# Altium footprint library Radolovic_PCB_Library.PcbLib: 38 footprints (part 3 of 3)
Each footprint in its own frame and in the unit in brackets; x right, y up, seen from the top. Pads: shape width x height; smd on the part's side, far side on the other; paste and mask are expansions set on the pad; w line width, h text height; cw(c..) or ccw(c..) is an arc to the next point about the centre after c.
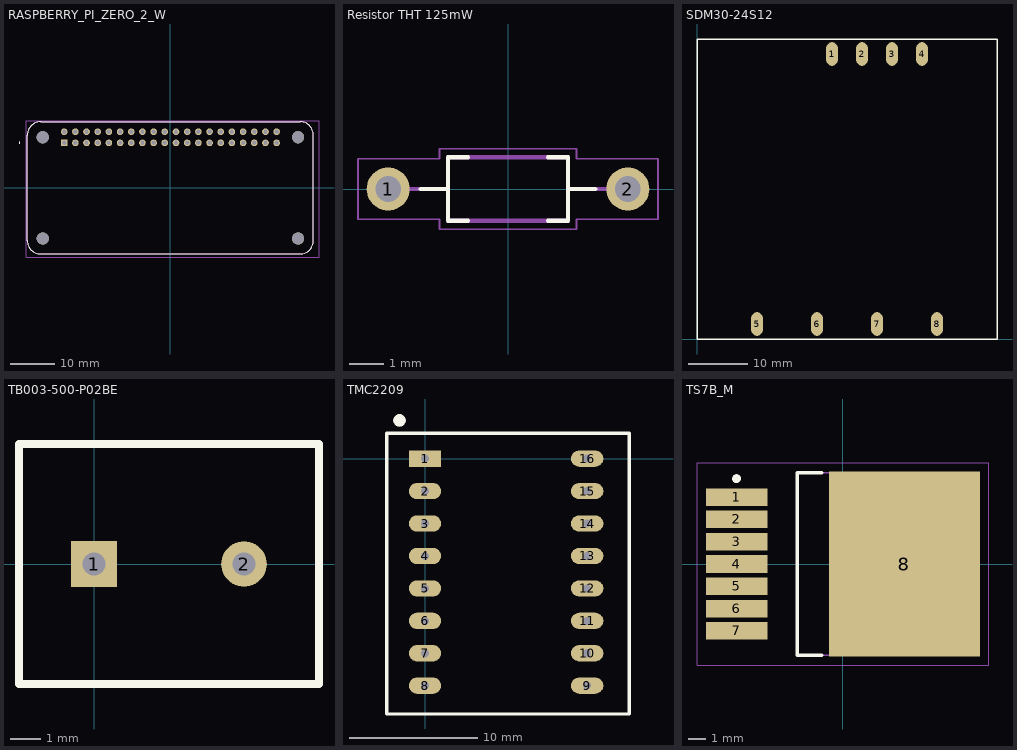
[diagram p2: the footprints below, top view; thin cyan lines are the x and y axes]

## RASPBERRY_PI_ZERO_2_W [mm]
pads (44):
  rect 1.508x1.508 / inner round 1.508 / far side rect 1.508x1.508 hole 1: 1(-24.13,10.23)
  round 1.508 hole 1: 2(-24.13,12.77) 3(-21.59,10.23) 4(-21.59,12.77) 5(-19.05,10.23) 6(-19.05,12.77) 7(-16.51,10.23) 8(-16.51,12.77) 9(-13.97,10.23) 10(-13.97,12.77) 11(-11.43,10.23) 12(-11.43,12.77) 13(-8.89,10.23) 14(-8.89,12.77) 15(-6.35,10.23) 16(-6.35,12.77) 17(-3.81,10.23) 18(-3.81,12.77) 19(-1.27,10.23) 20(-1.27,12.77) 21(1.27,10.23) 22(1.27,12.77) 23(3.81,10.23) 24(3.81,12.77) 25(6.35,10.23) 26(6.35,12.77) 27(8.89,10.23) 28(8.89,12.77) 29(11.43,10.23) 30(11.43,12.77) 31(13.97,10.23) 32(13.97,12.77) 33(16.51,10.23) 34(16.51,12.77) 35(19.05,10.23) 36(19.05,12.77) 37(21.59,10.23) 38(21.59,12.77) 39(24.13,10.23) 40(24.13,12.77)
  round 2.75 hole 2.75 unplated: ""(-29,-11.5) ""(-29,11.5) ""(29,-11.5) ""(29,11.5)
Top Overlay:
  circle w0.2: c-34.29,10.23 r0.1
  lines w0.127: 4.4,-15 12.75,-15 ; 17,-15 25.35,-15 ; -32.5,-12 ccw(c-29.5,-12) -29.5,-15 29.5,-15 ccw(c29.5,-12) 32.5,-12 32.5,12 ccw(c29.5,12) 29.5,15 -29.5,15 ccw(c-29.5,12) -32.5,12 -32.5,-12
Mechanical 13:
  circle w0.2: c-34.29,10.23 r0.1
  lines w0.127: 4.4,-15 12.75,-15 ; 17,-15 25.35,-15 ; -32.5,-12 ccw(c-29.5,-12) -29.5,-15 29.5,-15 ccw(c29.5,-12) 32.5,-12 32.5,12 ccw(c29.5,12) 29.5,15 -29.5,15 ccw(c-29.5,12) -32.5,12 -32.5,-12
Mechanical 15:
  lines w0.05: -32.75,-15.75 -32.75,15.25 33.75,15.25 33.75,-15.75 -32.75,-15.75
3D body "step_temp.STEP": height 4.57, standoff -1.04, extent -32.5,-16 33.5,15

## Resistor THT 125mW [mm]
height 3.85
pads (2):
  round 1.258 hole 0.75: 1(-3.5,0) 2(3.5,0)
Top Overlay:
  lines w0.127: -2.55,0 -1.75,0 ; -1.17,-0.925 -1.75,-0.925 -1.75,0 ; -1.17,0.925 -1.75,0.925 -1.75,0 ; 1.17,-0.925 1.75,-0.925 1.75,0 ; 1.17,0.925 1.75,0.925 1.75,0 ; 2.55,0 1.75,0
Mechanical 13:
  lines w0.127: -2.925,0 -1.75,0 ; 2.925,0 1.75,0 ; -1.75,0 -1.75,0.925 1.75,0.925 1.75,0 ; -1.75,0 -1.75,-0.925 1.75,-0.925 1.75,0
Mechanical 15:
  lines w0.05: -4.38,-0.88 -4.38,0.88 -2,0.88 -2,1.175 2,1.175 2,0.88 4.38,0.88 4.38,-0.88 2,-0.88 2,-1.175 -2,-1.175 -2,-0.88 -4.38,-0.88
3D body "step_temp.STEP": height 1.84, standoff -3.6, extent -3.723,-0.923 3.723,0.923

## SDM30-24S12 [mm] "SDM30-24S12"
pads (8):
  oval 2x4 hole 0.4: 1(22.86,48.26) 2(27.94,48.26) 3(33.02,48.26) 4(38.1,48.26) 5(10.16,2.54) 6(20.32,2.54) 7(30.48,2.54) 8(40.64,2.54)
Top Overlay:
  lines w0.254: 0,0 50.8,0 50.8,50.8 0,50.8 0,0

## TB003-500-P02BE [mil]
pads (2):
  rect 60x60 hole 30: 1(0,0)
  round 60 hole 30: 2(196.85,0)
Top Overlay:
  lines w10: -98.43,-157.48 -98.43,157.48 295.28,157.48 295.28,-157.48 -98.43,-157.48

## TMC2209 [mm]
pads (17):
  rect 2.54x1.27 hole 0.635: 1(0,0)
  oval 2.54x1.27 hole 0.635: 2(0,-2.54) 3(0,-5.08) 4(0,-7.62) 5(0,-10.16) 6(0,-12.7) 7(0,-15.24) 8(0,-17.78) 9(12.7,-17.78) 10(12.7,-15.24) 11(12.7,-12.7) 12(12.7,-10.16) 13(12.7,-7.62) 14(12.7,-5.08) 15(12.7,-2.54) 16(12.7,0)
  round 1 on Top Overlay: ""(-2,3)
Top Overlay:
  lines w0.254: -3,-20 16,-20 16,2 -3,2 -3,-20

## TS7B_M [mm] "D2-PAK, 8-Leads, Body 8.6x10.2mm, Pitch 1.27mm, Lead Span 14.1mm, IPC Low Density"
height 4.64
pads (8):
  rect 3.5x1 smd: 1(-6.05,3.81) 2(-6.05,2.54) 3(-6.05,1.27) 4(-6.05,0) 5(-6.05,-1.27) 6(-6.05,-2.54) 7(-6.05,-3.81)
  rect 8.6x10.55 smd: 8(3.5,0)
Top Overlay:
  circle w0.25: c-6.05,4.86 r0.125
  lines w0.2: -1.2,-5.2 -2.6,-5.2 -2.6,5.2 -1.2,5.2
Mechanical 13:
  lines w0.1: -2.6,-5.2 -2.6,5.2 6.29,5.2 6.29,-5.2 -2.6,-5.2
Mechanical 15:
  lines w0.05: -8.3,-5.775 -8.3,5.775 8.3,5.775 8.3,-5.775 -8.3,-5.775
  lines w0.1: -0.5,0 0.5,0 ; 0,-0.5 0,0.5
3D body: height 4.64, standoff 0, extent -2.6,-5.2 6.29,5.2